# Altium schematic symbol library BUZZER.SchLib: 1 symbol
Pins are listed as number, name and electrical type; pins without a type are passive.

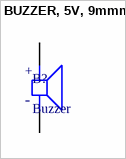
[diagram p0: symbol BUZZER, 5V, 9mmm]

## BUZZER, 5V, 9mmm
designator B?, comment Buzzer
Electromagnetic Buzzer; Manufacturer: Soberton; Manufacturer Part Number: GT-0905A; Frequency: 2.73kHz; Operating Supply Current: 80mA; Voltage Rating: 5V; Supplier: DigiKey; Supplier Part Number: 433-1033-ND; RoHS: Compliant; Category: Audio Products; Stock: 37843; Pricing: 1=1.27, 10=0.958, 25=0.8608, 50=0.7954, 100=0.7361, 250=0.66588, 500=0.61822, 1000=0.57471, 5000=0.48747 (USD); Height: 4.5mm; Lead Free: Lead Free; Max Operating Temperature: 60°C; Min Operating Temperature: -20°C; Mounting Technology: Through Hole; Packaging: Tape & Reel (TR); Sensing Method: Magnetic; Termination: PC Pins; ComponentLink1URL: https://datasheet.octopart.com:443/GT-0905A-Soberton-datasheet-189107844.pdf?src-supplier=Master+Electronics; ComponentLink1Description: https://datasheet.octopart.com:443/GT-0905A-Soberton-datasheet-189107844.pdf?src-supplier=Master+Electronics; ComponentLink2Description: LINK MUA; ComponentLink2URL: https://linhkien.cxtvn.com/3372-coi-chip-3512v-tmb09a05-9x5mm.html; ComponentLink3Description: MADE BY; ComponentLink3URL: HOANGBEU
footprint BUZZER,5V,9mm
pins: 1, 2
text: +; -